# Altium footprint library DS3234S.PcbLib: 1 footprints
Each footprint in its own frame and in the unit in brackets; x right, y up, seen from the top. Pads: shape width x height; smd on the part's side, far side on the other; paste and mask are expansions set on the pad; w line width, h text height; cw(c..) or ccw(c..) is an arc to the next point about the centre after c.
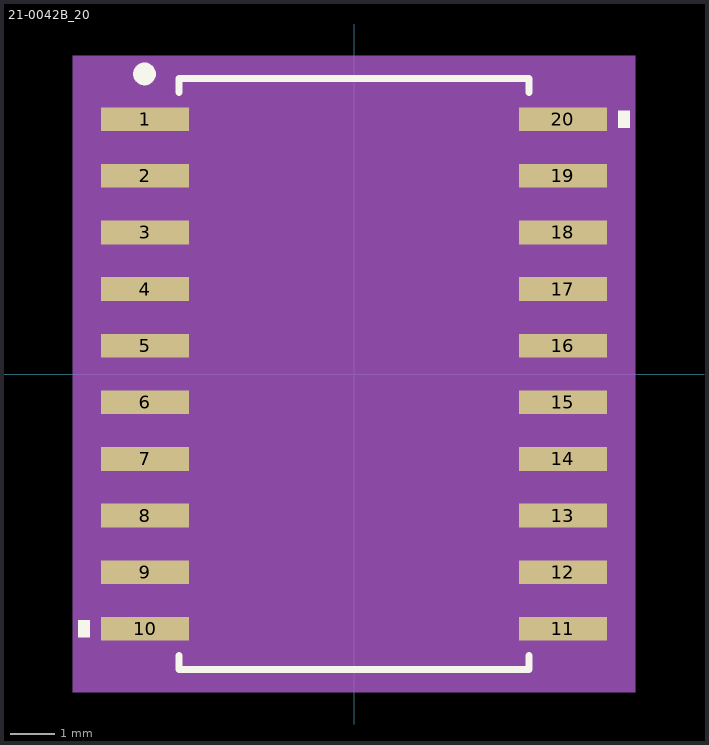
[diagram p0: the footprint, top view; thin cyan lines are the x and y axes]

## 21-0042B_20 [mil]
pads (20):
  rect 78x21 smd paste+0 mask+0: 1(-184.5,225) 2(-184.5,175) 3(-184.5,125) 4(-184.5,75) 5(-184.5,25) 6(-184.5,-25) 7(-184.5,-75) 8(-184.5,-125) 9(-184.5,-175) 10(-184.5,-225) 11(184.5,-225) 12(184.5,-175) 13(184.5,-125) 14(184.5,-75) 15(184.5,-25) 16(184.5,25) 17(184.5,75) 18(184.5,125) 19(184.5,175) 20(184.5,225)
Top Overlay:
  circle w10: c-185,265 r5
  region: 233.5,232.5 243.5,232.5 243.5,217.5 233.5,217.5
  region: -233.5,-217.5 -243.5,-217.5 -243.5,-232.5 -233.5,-232.5
  lines w6: -154.5,-248.6 -154.5,-261 154.5,-261 154.5,-248.6 ; -154.5,248.6 -154.5,261 154.5,261 154.5,248.6
Mechanical 5:
  region: 248.5,-281 -248.5,-281 -248.5,281 248.5,281
Mechanical 13:
  lines w0: -12,256 ccw(c0,256) 12,256
  lines w1: -209.5,-234.5 -149.5,-234.5 -149.5,-215.5 -209.5,-215.5 -209.5,-234.5 ; -209.5,-184.5 -149.5,-184.5 -149.5,-165.5 -209.5,-165.5 -209.5,-184.5 ; -209.5,-134.5 -149.5,-134.5 -149.5,-115.5 -209.5,-115.5 -209.5,-134.5 ; -209.5,-84.5 -149.5,-84.5 -149.5,-65.5 -209.5,-65.5 -209.5,-84.5 ; -209.5,-34.5 -149.5,-34.5 -149.5,-15.5 -209.5,-15.5 -209.5,-34.5 ; -209.5,15.5 -149.5,15.5 -149.5,34.5 -209.5,34.5 -209.5,15.5 ; -209.5,65.5 -149.5,65.5 -149.5,84.5 -209.5,84.5 -209.5,65.5 ; -209.5,115.5 -149.5,115.5 -149.5,134.5 -209.5,134.5 -209.5,115.5 ; -209.5,165.5 -149.5,165.5 -149.5,184.5 -209.5,184.5 -209.5,165.5 ; -209.5,215.5 -149.5,215.5 -149.5,234.5 -209.5,234.5 -209.5,215.5 ; -149.5,-256 -149.5,256 149.5,256 149.5,-256 -149.5,-256 ; 149.5,-234.5 209.5,-234.5 209.5,-215.5 149.5,-215.5 149.5,-234.5 ; 149.5,-184.5 209.5,-184.5 209.5,-165.5 149.5,-165.5 149.5,-184.5 ; 149.5,-134.5 209.5,-134.5 209.5,-115.5 149.5,-115.5 149.5,-134.5 ; 149.5,-84.5 209.5,-84.5 209.5,-65.5 149.5,-65.5 149.5,-84.5 ; 149.5,-34.5 209.5,-34.5 209.5,-15.5 149.5,-15.5 149.5,-34.5 ; 149.5,15.5 209.5,15.5 209.5,34.5 149.5,34.5 149.5,15.5 ; 149.5,65.5 209.5,65.5 209.5,84.5 149.5,84.5 149.5,65.5 ; 149.5,115.5 209.5,115.5 209.5,134.5 149.5,134.5 149.5,115.5 ; 149.5,165.5 209.5,165.5 209.5,184.5 149.5,184.5 149.5,165.5 ; 149.5,215.5 209.5,215.5 209.5,234.5 149.5,234.5 149.5,215.5
  text "*" at -147,203 h50
Mechanical 15:
  region: -159.5,-245.5 -233.5,-245.5 -233.5,245.5 -159.5,245.5 -159.5,266 159.5,266 159.5,245.5 233.5,245.5 233.5,-245.5 159.5,-245.5 159.5,-266 -159.5,-266
  lines w6: -233.5,-245.5 -159.5,-245.5 -159.5,-266 159.5,-266 159.5,-245.5 233.5,-245.5 233.5,245.5 159.5,245.5 159.5,266 -159.5,266 -159.5,245.5 -233.5,245.5 -233.5,-245.5
3D body "21-0042B_20-M.step": height 104.09, standoff 0, extent -209.49,-255.98 209.49,255.99